# Altium schematic symbol library Centralize.SchLib: 1081 symbols (part 12 of 26)
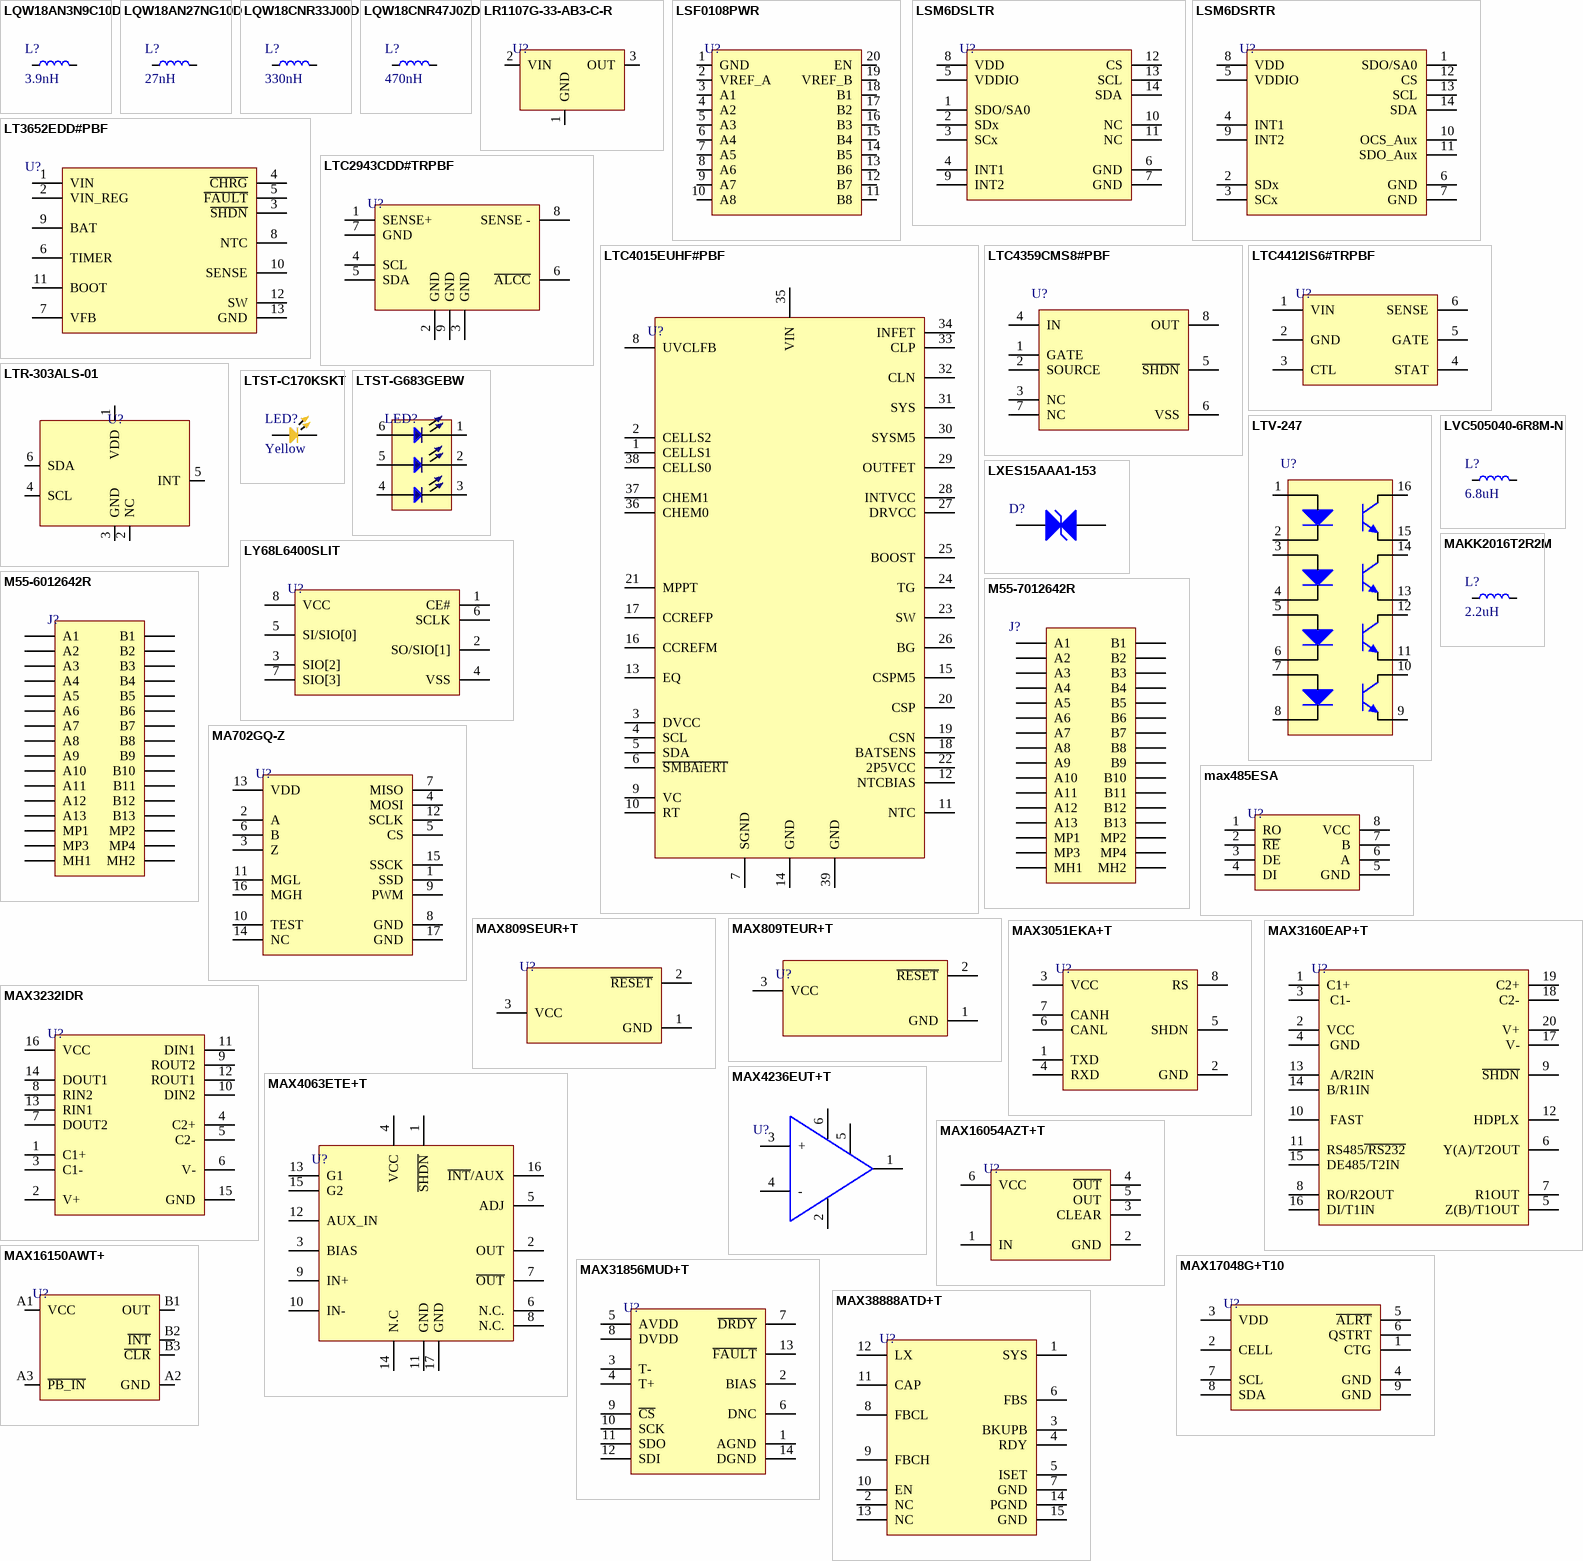
[diagram p58: symbols LQW18AN3N9C10D to MAX38888ATD+T]

## MAX31856MUD+T
designator U?
IC CONV THERMOCOUPLE 14TSSOP; Manufacturer: Maxim; Manufacturer Part Number: MAX31856MUD+T; Interface: SPI; Operating Supply Current: 1.2mA; Output Type: Digital; Supplier 1: Arrow Electronics; RoHS: Yes; Category: Interface ICs; Stock 1: 2890; Pricing 1: 1=10.21890, 10=9.52090, 25=9.06320, 100=7.80510, 250=7.38990, 500=6.66890, 1000=6.39750, 3000=6.32960 (USD); Mount: Surface Mount; Case/Package: TSSOP; Number of Pins: 14; Min Operating Temperature: -55°C; Max Operating Temperature: 125°C; Packaging: Tape and Reel; RoHS Compliant: Yes; ComponentLink1URL: https://media.digikey.com/pdf/Data%20Sheets/Maxim%20PDFs/PartNumberBreakdown_ds.pdf?src-supplier=Digi-Key; ComponentLink1Description: https://media.digikey.com/pdf/Data%20Sheets/Maxim%20PDFs/PartNumberBreakdown_ds.pdf?src-supplier=Digi-Key; ComponentLink2URL: http://datasheets.maximintegrated.com/en/ds/MAX31856.pdf?src-supplier=Avnet; ComponentLink2Description: http://datasheets.maximintegrated.com/en/ds/MAX31856.pdf?src-supplier=Avnet; Supplier Part Number 1: MAX31856MUD+T; LCSC Part Number: C2653162; Item Type: IC
footprint 14-TSSOP
pins: 1 AGND, 2 BIAS, 3 T-, 4 T+, 5 AVDD, 6 DNC, 7 ~{DRDY}, 8 DVDD, 9 ~{CS}, 10 SCK, 11 SDO, 12 SDI, 13 ~{F}~{AULT}, 14 DGND

## MAX38888ATD+T
designator U?
IC BATT MFUNC SUPERCAP 14TDFN; Manufacturer: Maxim; Manufacturer Part Number: MAX38888ATD+T; Supplier 1: Mouser; RoHS: No; Category: Battery Management; Stock 1: 1586; Pricing 1: 1=8.16, 10=7.38, 50=7.04, 100=6.11, 1000=5.15, 10000=4.97 (USD); Supplier Part Number 1: 700-MAX38888ATD+T; LCSC Part Number: C2931491; Item Type: IC
footprint TDFN-14-EP(3x3)
pins: 1 SYS, 2 NC, 3 BKUPB, 4 RDY, 5 ISET, 6 FBS, 7 GND, 8 FBCL, 9 FBCH, 10 EN, 11 CAP, 12 LX, 13 NC, 14 PGND, 15 GND

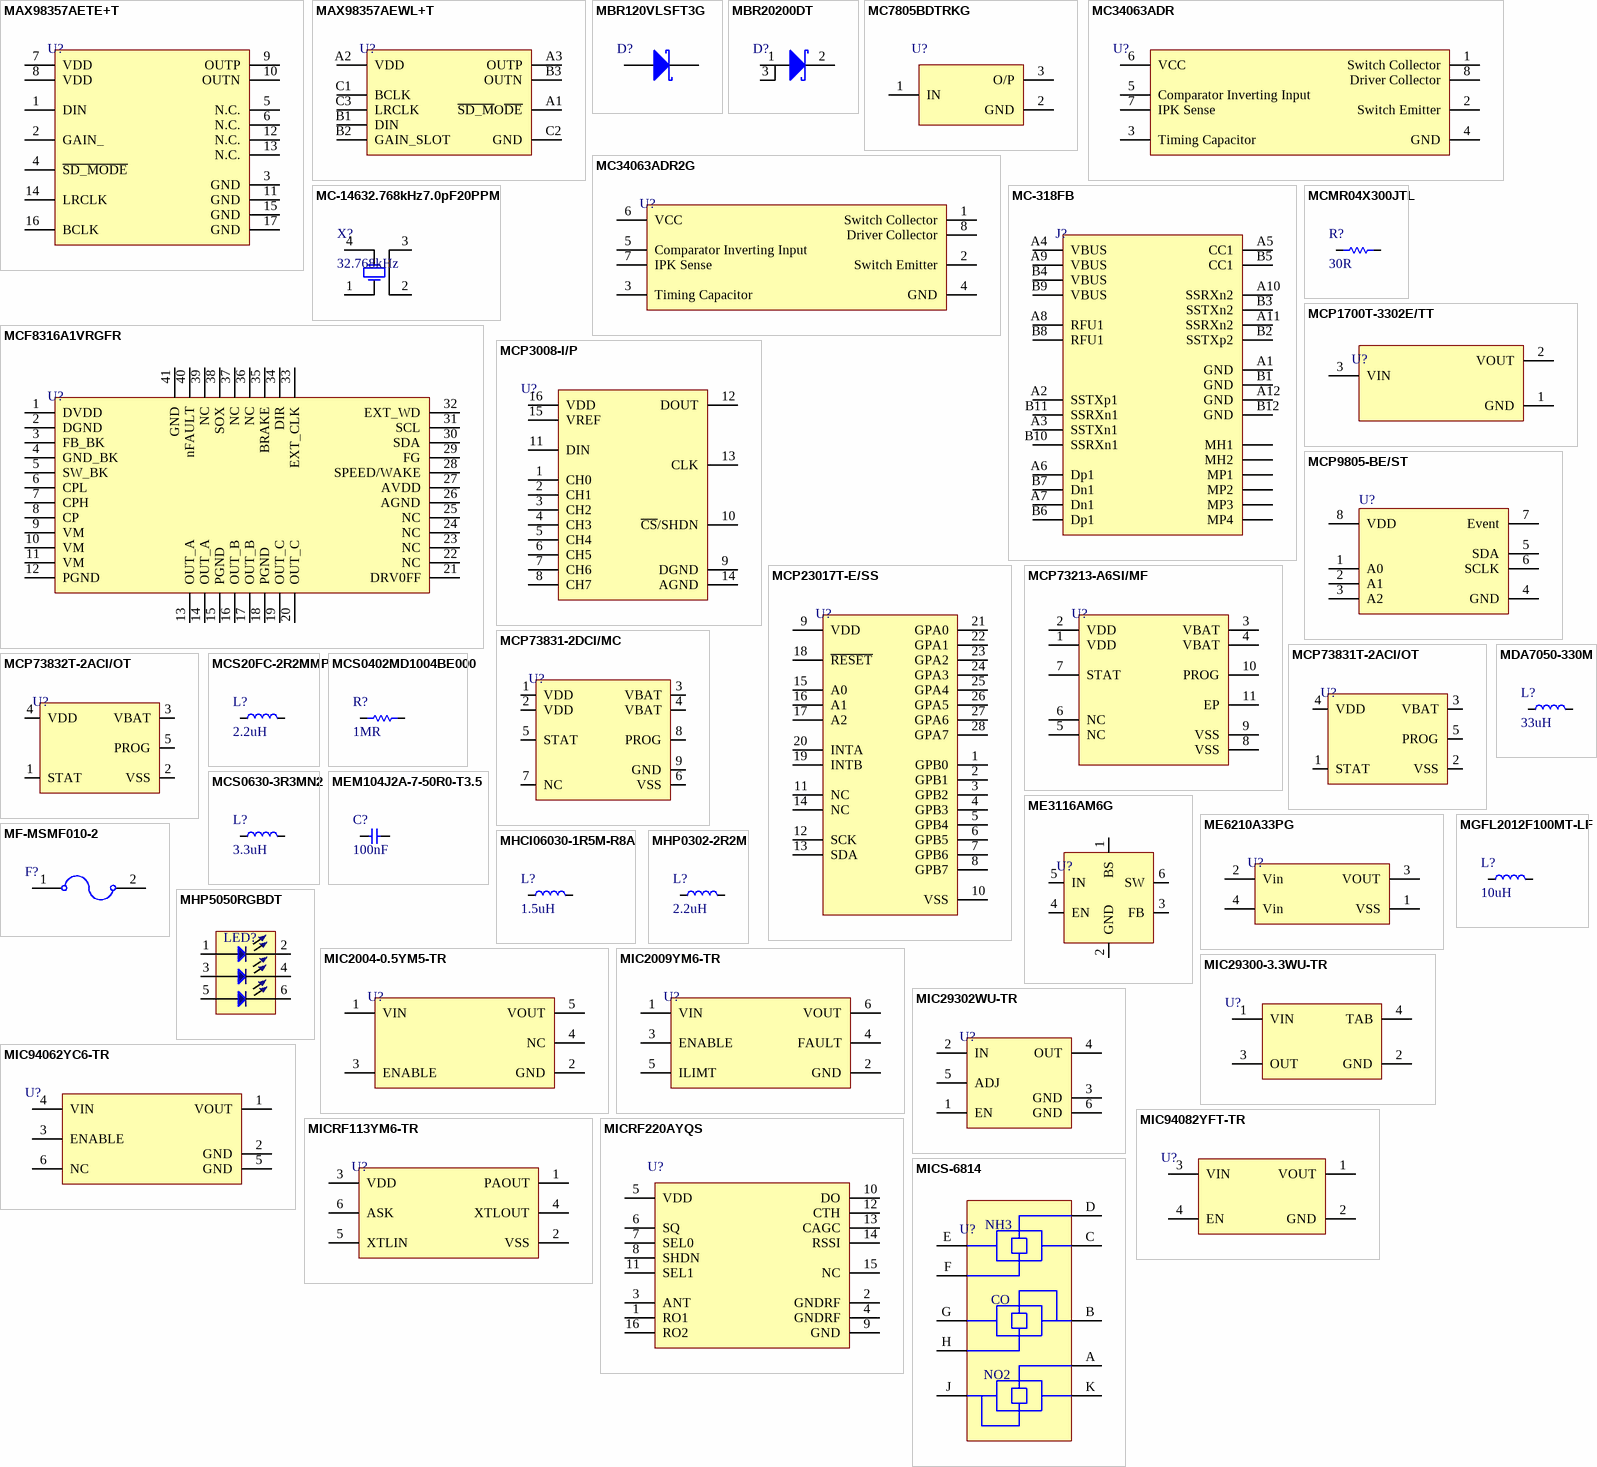
[diagram p15: symbols MAX98357AETE+T to MICS-6814]

## MAX98357AETE+T
designator U?
Audio Amplifier, 1 Func, PQCC16; Manufacturer: Maxim; Manufacturer Part Number: MAX98357AETE+T; Package Body Material: Plastic; Channels: 1; Package Equivalence Code: LCC16,.12SQ,20; Power Supplies: 5V; Max Supply Current: 3mA; Qualification Status: Not Qualified; Item Type: IC; Supplier 1: Arrow Electronics; RoHS: Yes; Category: Amplifiers - Audio; Stock 1: 2; Pricing 1: 1=2.83800 (USD); Case/Package: QCCN; Pins: 16; Package Shape: Square; Min Operating Temperature: -40°C; Max Operating Temperature: 85°C; Consumer IC Type: AUDIO AMPLIFIER; JESD-30 Code: S-PQCC-N16; Moisture Sensitivity Level: 1; Package Style: CHIP CARRIERMeter; Surface Mount: Yes; Terminal Form: No Lead; Terminal Position: QUAD; Terminal Pitch: 0.5mm; Temperature Grade: INDUSTRIAL; Reach SVHC Compliant: Yes; RoHS Compliant: Yes; ComponentLink1URL: https://datasheet.ciiva.com:443/pdfs/VipMasterIC/IC/MAXM/MAXM-S-A0007997446/MAXM-S-A0007997446-1.pdf?src-supplier=IHS+Markit; ComponentLink1Description: https://datasheet.ciiva.com:443/pdfs/VipMasterIC/IC/MAXM/MAXM-S-A0007997446/MAXM-S-A0007997446-1.pdf?src-supplier=IHS+Markit; ComponentLink2URL: https://datasheet.ciiva.com/29970/max98357a-max98357b-29970280.pdf?src-supplier=Avnet; ComponentLink2Description: https://datasheet.ciiva.com/29970/max98357a-max98357b-29970280.pdf?src-supplier=Avnet; Supplier Part Number 1: MAX98357AETE+T; LCSC Part Number: C910544
footprint TQFN-16-EP(3x3)
pins: 1 DIN, 2 GAIN_, 3 GND, 4 ~{SD_MODE}, 5 N.C., 6 N.C., 7 VDD, 8 VDD, 9 OUTP, 10 OUTN, 11 GND, 12 N.C., 13 N.C., 14 LRCLK, 15 GND, 16 BCLK, 17 GND

## MAX98357AEWL+T
designator U?
IC AUDIO AMP PCM D WLP; Manufacturer: Maxim; Manufacturer Part Number: MAX98357AEWL+T; Voltage Gain: 15dB; Min Supply Voltage: 2.5V; Max Supply Voltage: 5.5V; Max Output Power: 3.2W; Power Supply Rejection Ratio (PSRR): 77dB; Max Power Dissipation: 1.096W; Max Output current: 1.6A; Supplier 1: Arrow Electronics; RoHS: Yes; Category: Amplifiers - Audio; Stock 1: 2497; Pricing 1: 1=2.70500, 10=2.45700, 25=2.28600, 100=1.93500, 250=1.86200, 500=1.65900, 1000=1.54600 (USD); Mounting Technology: Surface Mount; Pins: 9; Contact Plating: Copper,Tin,Silver; Min Operating Temperature: -40°C; Max Operating Temperature: 85°C; Packaging: Tape and Reel; Package Quantity: 2500; Radiation Hardening: No; RoHS Compliant: Yes; ComponentLink1URL: https://datasheet.ciiva.com/45423/max98357a-max98357b-45423932.pdf?src-supplier=Digi-Key; ComponentLink1Description: https://datasheet.ciiva.com/45423/max98357a-max98357b-45423932.pdf?src-supplier=Digi-Key; Supplier Part Number 1: MAX98357AEWL+T; LCSC Part Number: C2682619; Item Type: IC
footprint 9-WLP (1.26x1.26)
pins: A1 ~{SD_M}O~{DE}, A2 VDD, A3 OUTP, B1 DIN, B2 GAIN_SLOT, B3 OUTN, C1 BCLK, C2 GND, C3 LRCLK

## MBR120VLSFT3G
designator D?
DIODE SCHOTTKY 20V 1A SOD123FL; Manufacturer: ON Semiconductor; Manufacturer Part Number: MBR120VLSFT3G; Max Surge Current: 45A; Forward Voltage: 340mV; Peak Reverse Current: 600uA; Element Configuration: Single; Polarity: Standard; Supplier 1: Digi-Key; Stock 1: 130499; Pricing 1: 1=0.42, 10=0.338, 100=0.2298, 500=0.17234, 1000=0.12926 (USD); Number of Pins: 2; Min Operating Temperature: -65°C; Max Operating Temperature: 125°C; Package Quantity: 10000; Forward Current: 1A; Packaging: Tape and Reel; Max Reverse Leakage Current: 600uA; Average Rectified Current: 1A; Peak Non-Repetitive Surge Current: 45A; Max Repetitive Reverse Voltage (Vrrm): 20V; Max Forward Surge Current (Ifsm): 45A; Voltage Rating (DC): 20V; Current Rating: 1A; Output Current: 1A; Max Reverse Voltage (DC): 20V; Radiation Hardening: No; REACH SVHC: No SVHC; Lead Free: Lead Free; Halogen Free: Halogen Free; ComponentLink1URL: http://www.mouser.com/ds/2/308/MBR120VLSFT1-D-107081.pdf?src-supplier=Mouser; ComponentLink1Description: http://www.mouser.com/ds/2/308/MBR120VLSFT1-D-107081.pdf?src-supplier=Mouser; ComponentLink2URL: http://www.onsemi.com/pub/Collateral/MBR120VLSFT1-D.PDF?src-supplier=Digi-Key; ComponentLink2Description: http://www.onsemi.com/pub/Collateral/MBR120VLSFT1-D.PDF?src-supplier=Digi-Key; ComponentLink3URL: http://www.onsemi.cn/pub_link/Collateral/MBR120VLSFT1-D.PDF?src-supplier=Avnet; ComponentLink3Description: http://www.onsemi.cn/pub_link/Collateral/MBR120VLSFT1-D.PDF?src-supplier=Avnet; Supplier Part Number 1: MBR120VLSFT3GOSCT-ND; LCSC Part Number: C295749
footprint SOD-123
pins: 1 A, 2 K

## MBR20200DT
designator D?
200V Single 920mV@10A 20A TO-252 Schottky Barrier Diodes (SBD) ROHS; Manufacturer: JUXING; Manufacturer Part Number: MBR20200DT; Item Type: Diode; Package: TO-252; LCSC Part Number: C3011045; ComponentLink1Description: LCSC; ComponentLink1URL: https://www.lcsc.com/product-detail/span-style-background-color-ff0-Schottky-span-Barrier-Diodes-SBD_JUXING-MBR20200DT_C3011045.html
footprint TO-252-2L
pins: 1, 2, 3

## MC7805BDTRKG
designator U?
IC REG LINEAR 5V 1A DPAK; Manufacturer: onsemi; Manufacturer Part Number: MC7805BDTRKG; Item Type: Regulator; Package: TO-252-2(DPAK); LCSC Part Number: C110908; ComponentLink1Description: LCSC; ComponentLink1URL: https://www.lcsc.com/product-detail/Linear-Voltage-Regulators-LDO_onsemi-MC7805BDTRKG_C110908.html
footprint DPAK_
pins: 1 IN, 2 GND, 3 O/P

## MC34063ADR
designator U?
IC REG BUCK BST ADJ 1.5A 8SOIC; Manufacturer: Texas Instruments; Manufacturer Part Number: MC34063ADR; Output Voltage: 40V; Number of Outputs: 1; Switching Frequency: 100kHz; Synchronous Rectifier: No; Output Type: Adjustable; Max Output Current: 750mA; Min Input Voltage: 3V; Min Output Voltage: 1.55V; Quiescent Current: 4mA; Topology: Flyback,SEPIC; Supplier 1: Digi-Key; RoHS: Yes; Category: Power Supply Modules; Stock 1: 17204; Pricing 1: 1=0.78000, 10=0.68400, 25=0.64240, 100=0.52420, 250=0.48688, 500=0.41438, 1000=0.34206 (USD); Case/Package: D; Number of Pins: 8; Weight: 0.002561oz; Contact Plating: Gold; Min Operating Temperature: 0°C; Max Operating Temperature: 70°C; Output Current: 1.5A; Packaging: Tape and Reel; Package Quantity: 1; Max Input Voltage: 40V; Max Output Voltage: 40V; Termination: SMD/SMT; Radiation Hardening: No; RoHS Compliant: Yes; Lead Free: Lead Free; REACH SVHC: No SVHC; ComponentLink1URL: https://datasheet.ciiva.com/7408/1862376-7408060.pdf?src-supplier=Newark; ComponentLink1Description: https://datasheet.ciiva.com/7408/1862376-7408060.pdf?src-supplier=Newark; ComponentLink2URL: https://datasheet.ciiva.com/2025/mc33063a-2025162.pdf?src-supplier=Digi-Key; ComponentLink2Description: https://datasheet.ciiva.com/2025/mc33063a-2025162.pdf?src-supplier=Digi-Key; ComponentLink3URL: https://datasheet.ciiva.com/2025/mc33063a-2025161.pdf?src-supplier=Digi-Key; ComponentLink3Description: https://datasheet.ciiva.com/2025/mc33063a-2025161.pdf?src-supplier=Digi-Key; ComponentLink4URL: https://datasheet.ciiva.com/2025/mc33063a-2025163.pdf?src-supplier=Digi-Key; ComponentLink4Description: https://datasheet.ciiva.com/2025/mc33063a-2025163.pdf?src-supplier=Digi-Key; Supplier Part Number 1: 296-17765-1-ND; LCSC Part Number: C100023; Item Type: IC
footprint SOIC-8
pins: 1 Switch Collector, 2 Switch Emitter, 3 Timing Capacitor, 4 GND, 5 Comparator Inverting Input, 6 VCC, 7 IPK Sense, 8 Driver Collector

## MC34063ADR2G
designator U?
IC REG BUCK BOOST INV ADJ 8SOIC; Manufacturer: ON Semiconductor; Manufacturer Part Number: MC34063ADR2G; Number of Outputs: 1; Output Voltage: 40V; Max Output Current: 1.5A; Min Input Voltage: 3V; Switching Frequency: 100kHz; Synchronous Rectifier: No; Min Output Voltage: 1.25V; Output Type: Adjustable; Supplier 1: Arrow Electronics; RoHS: Yes; Category: Voltage Regulators - Switching; Stock 1: 2000; Pricing 1: 1=0.59300, 10=0.47930, 25=0.47460, 100=0.29030, 250=0.28740, 500=0.28460, 1000=0.25300, 3000=0.22150 (USD); Mount: Surface Mount; Case/Package: SOIC; Number of Pins: 8; Contact Plating: Tin,Matte; Min Operating Temperature: 0°C; Max Operating Temperature: 70°C; Package Quantity: 1; Packaging: Tape and Reel; Output Current: 1.5A; Max Input Voltage: 40V; Max Output Voltage: 40V; Series: -; Switching Frequency-Max: 100kHz; Length: 5mm; Width: 4mm; Height: 1.5mm; Radiation Hardening: No; REACH SVHC: No SVHC; Lead Free: Lead Free; Halogen Free: Halogen Free; RoHS Compliant: Yes; ComponentLink1URL: https://datasheet.ciiva.com/34301/871666-34301629.pdf?src-supplier=Jameco; ComponentLink1Description: https://datasheet.ciiva.com/34301/871666-34301629.pdf?src-supplier=Jameco; ComponentLink2URL: https://datasheet.ciiva.com/15112/getdatasheetpartid-59933-15112667.pdf?src-supplier=Verical; ComponentLink2Description: https://datasheet.ciiva.com/15112/getdatasheetpartid-59933-15112667.pdf?src-supplier=Verical; ComponentLink3URL: https://datasheet.ciiva.com/2025/mc34063a-d-2025168.pdf?src-supplier=Digi-Key; ComponentLink3Description: https://datasheet.ciiva.com/2025/mc34063a-d-2025168.pdf?src-supplier=Digi-Key; ComponentLink4URL: https://datasheet.ciiva.com/3217/mc34063a-d-3217624.pdf?src-supplier=Avnet; ComponentLink4Description: https://datasheet.ciiva.com/3217/mc34063a-d-3217624.pdf?src-supplier=Avnet; ComponentLink5URL: https://datasheet.ciiva.com/3217/mc34063a-d-3217493.pdf?src-supplier=Avnet; ComponentLink5Description: https://datasheet.ciiva.com/3217/mc34063a-d-3217493.pdf?src-supplier=Avnet; ComponentLink6URL: https://datasheet.ciiva.com/2025/mc34063a-d-2025169.pdf?src-supplier=Digi-Key; ComponentLink6Description: https://datasheet.ciiva.com/2025/mc34063a-d-2025169.pdf?src-supplier=Digi-Key; ComponentLink7URL: https://datasheet.ciiva.com/2025/mc34063a-d-2025167.pdf?src-supplier=Digi-Key; ComponentLink7Description: https://datasheet.ciiva.com/2025/mc34063a-d-2025167.pdf?src-supplier=Digi-Key; Supplier Part Number 1: MC34063ADR2G; Item Type: IC
footprint SOIC-8
pins: 1 Switch Collector, 2 Switch Emitter, 3 Timing Capacitor, 4 GND, 5 Comparator Inverting Input, 6 VCC, 7 IPK Sense, 8 Driver Collector

## MC-318FB
designator J?
USB 3.0 3A 1 Brick nogging 24 Female -35℃~+75℃ Type-C SMD USB Connectors ROHS; Manufacturer: SOFNG; Manufacturer Part Number: MC-318FB; ComponentLink1Description: LCSC; ComponentLink1URL: https://www.lcsc.com/product-detail/USB-Connectors_SOFNG-MC-318FB_C2977724.html; Footprint: Custom; LCSC Part Number: C2977724
footprint MC-318FB
pins: A1 GND, A2 SSTXp1, A3 SSTXn1, A4 VBUS, A5 CC1, A6 Dp1, A7 Dn1, A8 RFU1, A9 VBUS, A10 SSRXn2, A11 SSRXn2, A12 GND, B1 GND, B2 SSTXp2, B3 SSTXn2, B4 VBUS, B5 CC1, B6 Dp1, B7 Dn1, B8 RFU1, B9 VBUS, B10 SSRXn1, B11 SSRXn1, B12 GND, MH1, MH2, MP1, MP2, MP3, MP4

## MC-14632.768kHz7.0pF20PPM
designator X?, comment 32.768kHz
32.768kHz SMD Crystal Resonator 7pF 65kΩ ±20ppm -40℃~+85℃ MC-146 Crystals ROHS; Manufacturer: Seiko Epson; Manufacturer Part Number: MC-14632.768kHz7.0pF20PPM; Footprint: MC-146; ComponentLink1Description: LCSC; ComponentLink1URL: https://www.lcsc.com/product-detail/Crystals_Seiko-Epson-MC-14632-768kHz7-0pF20PPM_C94977.html; LCSC Part Number: C94977
footprint MC-146_
pins: 1 OSC1, 2, 3, 4 OSC2

## MCF8316A1VRGFR
designator U?
40-V max, 8-A peak, sensorless FOC control 3-phase BLDC motor driver 40-VQFN -40 to 125; Manufacturer: Texas Instruments; Manufacturer Part Number: MCF8316A1VRGFR; Supplier 1: Mouser; RoHS: No; Stock 1: 889; Pricing 1: 1=5.48000, 10=4.92000, 25=4.65000, 50=4.65000, 100=4.04000, 250=3.83000, 500=3.44000, 1000=3.00000, 10000=3.00000 (USD); Supplier Part Number 1: 595-MCF8316A1VRGFR; LCSC Part Number: C3681167
footprint 40-VQFN (7x5)
pins: 1 DVDD, 2 DGND, 3 FB_BK, 4 GND_BK, 5 SW_BK, 6 CPL, 7 CPH, 8 CP, 9 VM, 10 VM, 11 VM, 12 PGND, 13 OUT_A, 14 OUT_A, 15 PGND, 16 OUT_B, 17 OUT_B, 18 PGND, 19 OUT_C, 20 OUT_C, 21 DRV0FF, 22 NC, 23 NC, 24 NC, 25 NC, 26 AGND, 27 AVDD, 28 SPEED/WAKE, 29 FG, 30 SDA, 31 SCL, 32 EXT_WD, 33 EXT_CLK, 34 DIR, 35 BRAKE, 36 NC, 37 NC, 38 SOX, 39 NC, 40 nFAULT, 41 GND

## MCMR04X300JTL
designator R?, comment 30R
SMD Chip Resistor, Ceramic, 30 ohm, ± 5%, 62.5 mW, 0402 [1005 Metric], Thick Film, Sulfur Resistant; Manufacturer: Multicomp; Manufacturer Part Number: MCMR04X300JTL; Voltage Rating: 50V; Power Rating: 62.5mW; Temperature Coefficient: 100ppm/°C; Supplier 1: Farnell; RoHS: Yes; Category: Chip SMD Resistors; Pricing 1: 10=0.00420, 100=0.00380, 500=0.00330, 2500=0.00220, 5000=0.00180, 10000=0.00150, 50000=0.00110, 100000=0.00100 (GBP); Case/Package: 0402; Case Code (Metric): 1005; Case Code (Imperial): 0402; Packaging: Cut Tape; Value: 30R; Tolerance: 5%; Resistor Type: Ceramic; Voltage Rating (DC): 50V; Resistance Tolerance: 5%; Reach SVHC Compliant: Yes; RoHS Compliant: Yes; ComponentLink1URL: https://datasheet.ciiva.com/7942/1716706-7942703.pdf?src-supplier=Element14; ComponentLink1Description: https://datasheet.ciiva.com/7942/1716706-7942703.pdf?src-supplier=Element14; Supplier Part Number 1: 2072892; Item Type: Resistor
footprint Res-0402
pins: 1, 2

## MCP1700T-3302E/TT
designator U?
IC REG LDO 3.3V 0.25A SOT23-3; Manufacturer: Microchip; Manufacturer Part Number: MCP1700T-3302E/TT; Number of Outputs: 1; Min Input Voltage: 2.3V; Max Input Voltage: 6V; Dropout Voltage: 178mV; Output Current: 250mA; Max Power Dissipation: 369.6mW; Input Bias Current: 1.6uA; Polarity: Positive; Quiescent Current: 4uA; Accuracy: 2%; Output Type: Fixed; Supplier 1: Digi-Key; RoHS: Yes; Category: Voltage Regulators - Linear; Stock 1: 230029; Pricing 1: 1=0.50000, 25=0.42400, 100=0.37500 (USD); Mount: Surface Mount; Case/Package: SOT-23; Number of Pins: 3; Contact Plating: Tin,Matte; Min Operating Temperature: -40°C; Max Operating Temperature: 125°C; Nominal Output Voltage: 3.3V; Packaging: Tape and Reel; Output Voltage: 3.3V; Max Output Current: 250mA; Max Supply Voltage: 6V; Min Supply Voltage: 2.3V; Package Quantity: 3000; Min Output Voltage: 3.3V; Max Output Voltage: 3.3V; Termination: SMD/SMT; Output Voltage Accuracy: 2%; Nominal Supply Current: 4uA; Power Dissipation: 369.6mW; Supply Current: 4uA; Length: 2.9mm; Width: 1.3mm; Height: 0.95mm; Radiation Hardening: No; Reach SVHC Compliant: No SVHC; Lead Free: Lead Free; RoHS Compliant: Yes; ComponentLink1URL: https://datasheet.ciiva.com/5801/1784514-5801824.pdf?src-supplier=Farnell; ComponentLink1Description: https://datasheet.ciiva.com/5801/1784514-5801824.pdf?src-supplier=Farnell; ComponentLink2URL: https://datasheet.ciiva.com/2040/21826b-2040112.pdf?src-supplier=Digi-Key; ComponentLink2Description: https://datasheet.ciiva.com/2040/21826b-2040112.pdf?src-supplier=Digi-Key; ComponentLink3URL: https://datasheet.ciiva.com/7649/1784514-7649813.pdf?src-supplier=Element14; ComponentLink3Description: https://datasheet.ciiva.com/7649/1784514-7649813.pdf?src-supplier=Element14; ComponentLink4URL: https://datasheet.ciiva.com/22710/1784514-22710988.pdf?src-supplier=Element14; ComponentLink4Description: https://datasheet.ciiva.com/22710/1784514-22710988.pdf?src-supplier=Element14; ComponentLink5URL: https://datasheet.ciiva.com/14150/mcp1700-eng-tds-14150122.pdf?src-supplier=Distrelec; ComponentLink5Description: https://datasheet.ciiva.com/14150/mcp1700-eng-tds-14150122.pdf?src-supplier=Distrelec; ComponentLink6URL: https://datasheet.ciiva.com/8041/1784514-8041598.pdf?src-supplier=Element14; ComponentLink6Description: https://datasheet.ciiva.com/8041/1784514-8041598.pdf?src-supplier=Element14; ComponentLink7URL: https://datasheet.ciiva.com/3224/jp011779-3224133.pdf?src-supplier=Avnet; ComponentLink7Description: https://datasheet.ciiva.com/3224/jp011779-3224133.pdf?src-supplier=Avnet; ComponentLink8URL: https://datasheet.ciiva.com/16208/filehandler-aspxddocname-en011779-16208911.pdf?src-supplier=Future+Electronics; ComponentLink8Description: https://datasheet.ciiva.com/16208/filehandler-aspxddocname-en011779-16208911.pdf?src-supplier=Future+Electronics; ComponentLink9URL: https://datasheet.ciiva.com/15200/getdatasheetpartid-453599-15200229.pdf?src-supplier=Verical; ComponentLink9Description: https://datasheet.ciiva.com/15200/getdatasheetpartid-453599-15200229.pdf?src-supplier=Verical; ComponentLink10URL: https://datasheet.ciiva.com/2040/21826b-2040113.pdf?src-supplier=Digi-Key; ComponentLink10Description: https://datasheet.ciiva.com/2040/21826b-2040113.pdf?src-supplier=Digi-Key; ComponentLink11URL: https://datasheet.ciiva.com/2040/21826b-2040114.pdf?src-supplier=Digi-Key; ComponentLink11Description: https://datasheet.ciiva.com/2040/21826b-2040114.pdf?src-supplier=Digi-Key; ComponentLink12URL: https://datasheet.ciiva.com/29305/651414-da-01-en-ic-reg-ld-mcp1700t-3302e-tt-sot-23-3-mcp-29305258.pdf?src-supplier=Conrad; ComponentLink12Description: https://datasheet.ciiva.com/29305/651414-da-01-en-ic-reg-ld-mcp1700t-3302e-tt-sot-23-3-mcp-29305258.pdf?src-supplier=Conrad; Supplier Part Number 1: MCP1700T3302ETTCT-ND; Item Type: IC
footprint SOT-23 (TRANS NPN 40V 0.6A SOT23)
pins: 1 GND, 2 VOUT, 3 VIN

## MCP3008-I/P
designator U?
IC ADC 10BIT SAR 16DIP; Manufacturer: Microchip; Manufacturer Part Number: MCP3008-I/P; Resolution: 10b; Sampling Rate: 200KS/s; Number of A/D Converters: 1; Polarity: Unipolar; Min Supply Voltage: 2.7V; Max Supply Voltage: 5.5V; Interface: SPI,Serial,4-WIRE; Number of Channels: 8; Number of Bits: 10; Differential Nonlinearity: 1LSB; Signal to Noise Ratio (SNR): 200dB; Nominal Supply Current: 425uA; Input Type: SINGLE-ENDED; Operating Supply Voltage: 5V; Supplier 1: Digi-Key; Stock 1: 1628; Pricing 1: 1=2.41, 25=2, 100=1.83 (USD); Mount: Through Hole; Case/Package: PDIP; Number of Pins: 16; Weight: 0.01lb; Min Operating Temperature: -40°C; Max Operating Temperature: 85°C; Package Quantity: 30; Packaging: Rail/Tube; Number of Converters: 1; Number of Elements: 1; Conversion Rate: 200KS/s; Integral Nonlinearity (INL): 1LSB; Supply Current: 425uA; Length: 19.05mm; Width: 6.35mm; Height: 3.3mm; Radiation Hardening: No; REACH SVHC: No SVHC; Lead Free: Lead Free; RoHS Compliant: Yes; ComponentLink1URL: http://www.farnell.com/datasheets/808965.pdf?src-supplier=Element14; ComponentLink1Description: http://www.farnell.com/datasheets/808965.pdf?src-supplier=Element14; ComponentLink2URL: http://ww1.microchip.com/downloads/jp/DeviceDoc/jp011593.pdf?src-supplier=Avnet; ComponentLink2Description: http://ww1.microchip.com/downloads/jp/DeviceDoc/jp011593.pdf?src-supplier=Avnet; ComponentLink3URL: http://ww1.microchip.com/downloads/jp/DeviceDoc/jp011593.pdf?src-supplier=Avnet+Europe; ComponentLink3Description: http://ww1.microchip.com/downloads/jp/DeviceDoc/jp011593.pdf?src-supplier=Avnet+Europe; ComponentLink4URL: http://www.microchip.com/mymicrochip/filehandler.aspx?ddocname=en023833&src-supplier=Digi-Key; ComponentLink4Description: http://www.microchip.com/mymicrochip/filehandler.aspx?ddocname=en023833&src-supplier=Digi-Key; Supplier Part Number 1: MCP3008-I/P-ND; LCSC Part Number: C2890491
footprint PDIP-16
pins: 1 CH0, 2 CH1, 3 CH2, 4 CH3, 5 CH4, 6 CH5, 7 CH6, 8 CH7, 9 DGND, 10 ~{CS}/SHDN, 11 DIN, 12 DOUT, 13 CLK, 14 AGND, 15 VREF, 16 VDD

## MCP9805-BE/ST
designator U?
IC SENSOR THERMAL 3.0V 8TSSOP; Manufacturer: Microchip; Manufacturer Part Number: MCP9805-BE/ST; Min Supply Voltage: 3V; Max Supply Voltage: 3.6V; Output Current: 1uA; Interface: I2C,SMBus,2-Wire,Serial; Resolution: 10b; Operating Supply Current: 200uA; Accuracy: 2%; Number of Bits: 10; Output Type: I2C,Digital; Sensor Type: Temperature; Sensing Method: Resistive; ComponentLink1URL: https://datasheet.ciiva.com/22737/1678782-22737270.pdf?src-supplier=Element14; ComponentLink1Description: https://datasheet.ciiva.com/22737/1678782-22737270.pdf?src-supplier=Element14; ComponentLink2URL: https://datasheet.ciiva.com/43467/1678782-43467032.pdf?src-supplier=Farnell; ComponentLink2Description: https://datasheet.ciiva.com/43467/1678782-43467032.pdf?src-supplier=Farnell; ComponentLink3URL: https://datasheet.ciiva.com/22673/1678782-22673662.pdf?src-supplier=Element14; ComponentLink3Description: https://datasheet.ciiva.com/22673/1678782-22673662.pdf?src-supplier=Element14; Supplier 1: Digi-Key; RoHS: Yes; Category: Power Management ICs; Stock 1: 667; Pricing 1: 1=0.85000, 25=0.71000, 100=0.65000 (USD); Mount: Surface Mount; Case/Package: TSSOP; Number of Pins: 8; Min Operating Temperature: -40°C; Max Operating Temperature: 125°C; Package Quantity: 100; Packaging: Rail/Tube; Max Supply Voltage (DC): 3.6V; Min Supply Voltage (DC): 3V; Termination: SMD/SMT; Length: 3mm; Width: 4.4mm; Height: 1mm; Radiation Hardening: No; REACH SVHC: No SVHC; Lead Free: Lead Free; RoHS Compliant: Yes; ComponentLink4URL: https://datasheet.ciiva.com/1514/1791047-1514016.pdf?src-supplier=Element14; ComponentLink4Description: https://datasheet.ciiva.com/1514/1791047-1514016.pdf?src-supplier=Element14; ComponentLink5URL: https://datasheet.ciiva.com/2003/21977b-2003478.pdf?src-supplier=Digi-Key; ComponentLink5Description: https://datasheet.ciiva.com/2003/21977b-2003478.pdf?src-supplier=Digi-Key; ComponentLink6URL: https://datasheet.ciiva.com/5299/21977b-77986-5299688.pdf?src-supplier=Mouser; ComponentLink6Description: https://datasheet.ciiva.com/5299/21977b-77986-5299688.pdf?src-supplier=Mouser; ComponentLink7URL: https://datasheet.ciiva.com/3279/21977b-3279902.pdf?src-supplier=Avnet; ComponentLink7Description: https://datasheet.ciiva.com/3279/21977b-3279902.pdf?src-supplier=Avnet; Supplier Part Number 1: MCP9805-BE/ST-ND; LCSC Part Number: C636441; Item Type: IC
footprint 8-TSSOP (IC SENSOR THERMAL 3.0V 8TSSOP)
pins: 1 A0, 2 A1, 3 A2, 4 GND, 5 SDA, 6 SCLK, 7 Event, 8 VDD

## MCP23017T-E/SS
designator U?
IC XPNDR 1.7MHZ I2C 28SSOP; Manufacturer: Microchip; Manufacturer Part Number: MCP23017T-E/SS; Operating Supply Voltage: 5.5V; Interface: I2C,Serial; Number of Channels: 1; Output Current: 25mA; Number of I/Os: 16; Power Dissipation: 700mW; Clock Frequency: 10MHz; Output Type: PUSH-PULL; Supply Current: 1mA; Supplier 1: Digi-Key; RoHS: Yes; Category: Interface ICs; Stock 1: 26314; Pricing 1: 1=1.69, 25=1.4, 100=1.28 (USD); Mounting Technology: Surface Mount; Case/Package: SSOP; Pins: 28; Min Operating Temperature: -40°C; Max Operating Temperature: 125°C; Package Quantity: 2100; Series: -; Packaging: Tape and Reel; Frequency: 1.7MHz; Number of Bits: 16; Nominal Supply Voltage: 5.5V; Lead Free: Lead Free; RoHS Compliant: Yes; ComponentLink1URL: https://datasheet.ciiva.com/12267/21952b-12267583.pdf?src-supplier=Mouser; ComponentLink1Description: https://datasheet.ciiva.com/12267/21952b-12267583.pdf?src-supplier=Mouser; ComponentLink2URL: https://datasheet.ciiva.com/8128/21952b-8128586.pdf?src-supplier=Avnet; ComponentLink2Description: https://datasheet.ciiva.com/8128/21952b-8128586.pdf?src-supplier=Avnet; ComponentLink3URL: https://datasheet.ciiva.com/16454/filehandler-aspxddocname-en023709-16454267.pdf?src-supplier=Future+Electronics; ComponentLink3Description: https://datasheet.ciiva.com/16454/filehandler-aspxddocname-en023709-16454267.pdf?src-supplier=Future+Electronics; ComponentLink4URL: https://datasheet.ciiva.com/1780/21952b-1780738.pdf?src-supplier=Digi-Key; ComponentLink4Description: https://datasheet.ciiva.com/1780/21952b-1780738.pdf?src-supplier=Digi-Key; Supplier Part Number 1: MCP23017T-E/SSCT-ND; LCSC Part Number: C558584; Item Type: IC
footprint SSOP-28-208mil
pins: 1 GPB0, 2 GPB1, 3 GPB2, 4 GPB3, 5 GPB4, 6 GPB5, 7 GPB6, 8 GPB7, 9 VDD, 10 VSS, 11 NC, 12 SCK, 13 SDA, 14 NC, 15 A0, 16 A1, 17 A2, 18 ~{RESET}, 19 INTB, 20 INTA, 21 GPA0, 22 GPA1, 23 GPA2, 24 GPA3, 25 GPA4, 26 GPA5, 27 GPA6, 28 GPA7

## MCP73213-A6SI/MF
designator U?
IC BATT CONTRL LI-ION 2CEL 10DFN; Manufacturer: Microchip; Manufacturer Part Number: MCP73213-A6SI/MF; Number of Cells: 2; Max Supply Voltage: 18V; Min Supply Voltage: 4.2V; Output Voltage: 8.4V; Max Output current: 1.1A; Operating Supply Current: 700uA; Drain to Source Resistance: 350mR; Max Output Voltage: 8.85V; Min Output Voltage: 8.15V; Fault Protection: Over Voltage; Supplier 1: Rs; RoHS: Yes; Category: Battery Management; Stock 1: 128; Pricing 1: 1=-1.00000, 25=1.85000, 100=1.76000 (GBP); Mounting Technology: Surface Mount; Case/Package: DFN; Pins: 10; Min Operating Temperature: -40°C; Max Operating Temperature: 85°C; Package Quantity: 120; Packaging: Rail/Tube; Number of Channels: 2; Max Charge Current: 1.1A; Voltage Rating: 8.85V; Series: -; Battery Pack Voltage: 8.4V; Length: 3mm; Width: 3mm; Height: 0.88mm; Radiation Hardening: No; Reach SVHC Compliant: Yes; Lead Free: Lead Free; RoHS Compliant: Yes; ComponentLink1URL: https://datasheet.ciiva.com/1137/554364-1137792.pdf?src-supplier=Element14; ComponentLink1Description: https://datasheet.ciiva.com/1137/554364-1137792.pdf?src-supplier=Element14; ComponentLink2URL: https://datasheet.ciiva.com/16453/filehandler-aspxddocname-en544011-16453863.pdf?src-supplier=Future+Electronics; ComponentLink2Description: https://datasheet.ciiva.com/16453/filehandler-aspxddocname-en544011-16453863.pdf?src-supplier=Future+Electronics; ComponentLink3URL: https://datasheet.ciiva.com/1137/22190b-1137793.pdf?src-supplier=Element14; ComponentLink3Description: https://datasheet.ciiva.com/1137/22190b-1137793.pdf?src-supplier=Element14; ComponentLink4URL: https://datasheet.ciiva.com/4873/22190a-13379-4873436.pdf?src-supplier=Mouser; ComponentLink4Description: https://datasheet.ciiva.com/4873/22190a-13379-4873436.pdf?src-supplier=Mouser; ComponentLink5URL: https://datasheet.ciiva.com/3213/22190b-3213399.pdf?src-supplier=Avnet; ComponentLink5Description: https://datasheet.ciiva.com/3213/22190b-3213399.pdf?src-supplier=Avnet; ComponentLink6URL: https://datasheet.ciiva.com/1933/22190b-1933113.pdf?src-supplier=Digi-Key; ComponentLink6Description: https://datasheet.ciiva.com/1933/22190b-1933113.pdf?src-supplier=Digi-Key; Supplier Part Number 1: 6878660; LCSC Part Number: C60668; Item Type: IC
footprint TDFN-10-EP(3x3)
pins: 1 VDD, 2 VDD, 3 VBAT, 4 VBAT, 5 NC, 6 NC, 7 STAT, 8 VSS, 9 VSS, 10 PROG, 11 EP

## MCP73831-2DCI/MC
designator U?
IC BATT CONTRL LI-ION 1CELL 8DFN; Manufacturer: Microchip; Manufacturer Part Number: MCP73831-2DCI/MC; Supplier: Digi-Key; Supplier Part Number: MCP73831-2DCI/MC-ND; RoHS: Yes; Category: Battery Management; Stock: 1881; Pricing: 1=0.82, 25=0.7, 100=0.63 (USD); ComponentLink1URL: https://datasheet.ciiva.com/12238/21984e-53484-12238219.pdf?src-supplier=Mouser; ComponentLink1Description: https://datasheet.ciiva.com/12238/21984e-53484-12238219.pdf?src-supplier=Mouser; ComponentLink2URL: https://datasheet.ciiva.com/3215/21984e-3215293.pdf?src-supplier=Avnet; ComponentLink2Description: https://datasheet.ciiva.com/3215/21984e-3215293.pdf?src-supplier=Avnet; ComponentLink3URL: https://datasheet.ciiva.com/1933/21984e-1933417.pdf?src-supplier=Digi-Key; ComponentLink3Description: https://datasheet.ciiva.com/1933/21984e-1933417.pdf?src-supplier=Digi-Key; LCSC Part Number: C635037; Item Type: IC
footprint DFN-8-EP(2x3)
pins: 1 VDD, 2 VDD, 3 VBAT, 4 VBAT, 5 STAT, 6 VSS, 7 NC, 8 PROG, 9 GND

## MCP73831T-2ACI/OT
designator U?
IC BATT CNTL LI-ION 1CEL SOT23-5; Manufacturer: Microchip; Manufacturer Part Number: MCP73831T-2ACI/OT; Number of Cells: 1; Max Supply Voltage: 6V; Output Voltage: 4.2V; Min Supply Voltage: 3.75V; Output Current: 500mA; Max Output Voltage: 4.5V; Max Power Dissipation: 1.54W; Drain to Source Resistance: 350mR; Min Output Voltage: 4.168V; Voltage Rating: 4.534V; Fault Protection: Over Voltage; Supplier: Rs; Supplier Part Number: 7386360; RoHS: Yes; Category: Battery Management; Stock: 95; Pricing: 5=0.708, 25=0.684, 100=0.664 (GBP); Mounting Technology: Surface Mount; Case/Package: SOT-23; Pins: 5; Weight: 0.00709oz; Min Operating Temperature: -40°C; Max Operating Temperature: 85°C; Number of Outputs: 1; Packaging: Tape and Reel; Number of Channels: 1; Termination: SMD/SMT; Max Charge Current: 500mA; Series: -; Battery Pack Voltage: 4.2V; Length: 3.1mm; Width: 1.8mm; Height: 1.3mm; Radiation Hardening: No; Reach SVHC Compliant: No; Lead Free: Lead Free; RoHS Compliant: Yes; ComponentLink1URL: https://datasheet.ciiva.com/22828/0900766b80d2b53a-22828876.pdf?src-supplier=Rs; ComponentLink1Description: https://datasheet.ciiva.com/22828/0900766b80d2b53a-22828876.pdf?src-supplier=Rs; ComponentLink2URL: https://datasheet.ciiva.com/26344/651521-da-01-en-contr-mcp73831t-2aci-ot-sot-23-5-mcp-26344458.pdf?src-supplier=Conrad; ComponentLink2Description: https://datasheet.ciiva.com/26344/651521-da-01-en-contr-mcp73831t-2aci-ot-sot-23-5-mcp-26344458.pdf?src-supplier=Conrad; ComponentLink3URL: https://datasheet.ciiva.com/1137/630369-1137803.pdf?src-supplier=Element14; ComponentLink3Description: https://datasheet.ciiva.com/1137/630369-1137803.pdf?src-supplier=Element14; ComponentLink4URL: https://datasheet.ciiva.com/28626/630369-28626439.pdf?src-supplier=Element14; ComponentLink4Description: https://datasheet.ciiva.com/28626/630369-28626439.pdf?src-supplier=Element14; ComponentLink5URL: https://datasheet.ciiva.com/46385/630369-46385324.pdf?src-supplier=Element14; ComponentLink5Description: https://datasheet.ciiva.com/46385/630369-46385324.pdf?src-supplier=Element14; ComponentLink6URL: https://datasheet.ciiva.com/1144/630369-1144461.pdf?src-supplier=Newark; ComponentLink6Description: https://datasheet.ciiva.com/1144/630369-1144461.pdf?src-supplier=Newark; LCSC Part Number: C424093; Item Type: IC
footprint SOT-23-5
pins: 1 STAT, 2 VSS, 3 VBAT, 4 VDD, 5 PROG

## MCP73832T-2ACI/OT
designator U?
IC LI-ION/LI-POLY CTRLR SOT23-5; Manufacturer: Microchip; Manufacturer Part Number: MCP73832T-2ACI/OT; Supplier: Rs; Supplier Part Number: 7386364P; RoHS: Yes; Category: Battery Management; Stock: 5495; Pricing: 25=0.6, 100=0.582 (GBP); ComponentLink1URL: https://datasheet.ciiva.com/1931/21984e-1931959.pdf?src-supplier=Digi-Key; ComponentLink1Description: https://datasheet.ciiva.com/1931/21984e-1931959.pdf?src-supplier=Digi-Key; ComponentLink2URL: https://datasheet.ciiva.com/1931/21984e-1931960.pdf?src-supplier=Digi-Key; ComponentLink2Description: https://datasheet.ciiva.com/1931/21984e-1931960.pdf?src-supplier=Digi-Key; ComponentLink3URL: https://datasheet.ciiva.com/1931/21984e-1931961.pdf?src-supplier=Digi-Key; ComponentLink3Description: https://datasheet.ciiva.com/1931/21984e-1931961.pdf?src-supplier=Digi-Key; LCSC Part Number: C38066; Item Type: IC
footprint SOT-23-5
pins: 1 STAT, 2 VSS, 3 VBAT, 4 VDD, 5 PROG

## MCS20FC-2R2MMP
designator L?, comment 2.2uH
IND SMD 1.5A 2.2uH ±20% 135mΩ; Manufacturer: PSA(Prosperity Dielectrics); Manufacturer Part Number: MCS20FC-2R2MMP; Item Type: Inductor; Package: SMD; LCSC Part Number: C375949; ComponentLink1Description: LCSC; ComponentLink1URL: https://www.lcsc.com/product-detail/Power-Inductors_PSA-Prosperity-Dielectrics-MCS20FC-2R2MMP_C375949.html
footprint MCS20FC-2R2MMP. (IND SMD 2.2uH 1.5A)
pins: 1, 2

## MCS0402MD1004BE000
designator R?, comment 1MR
RES 1M OHM 0.1% 1/16W 0402; Manufacturer: Vishay BCcomponents; Manufacturer Part Number: MCS0402MD1004BE000; Item Type: Resistor; Supplier: Mouser; Supplier Part Number: 594-MCS0402MD1004BE0; RoHS: Yes; Category: Chip SMD Resistors; Stock: 33788; Pricing: 1=0.56, 10=0.293, 50=0.293, 100=0.16, 1000=0.121, 10000=0.117 (USD); LCSC Part Number: C4334825
footprint Res-0402
pins: 1, 2

## MCS0630-3R3MN2
designator L?, comment 3.3uH
6A 3.3uH ±20% SMD Power Inductors ROHS; Manufacturer: PSA(Prosperity Dielectrics); Manufacturer Part Number: MCS0630-3R3MN2; Package: SMD; LCSC Part Number: C394166; Item Type: Inductor; ComponentLink1Description: LCSC; ComponentLink1URL: https://www.lcsc.com/product-detail/Power-Inductors_PSA-Prosperity-Dielectrics-MCS0630-3R3MN2_C394166.html
footprint MCS0630-3R3MN2
pins: 1, 2

## MDA7050-330M
designator L?, comment 33uH
33uH 2.3A ±20% SMD,6.6x7.3mm Inductors; Manufacturer: KOHERelec; Manufacturer Part Number: MDA7050-330M; LCSC Part Number: C2847546; Package: SMD,6.6x7.3mm; ComponentLink1Description: LCSC; ComponentLink1URL: https://www.lcsc.com/product-detail/Inductors-SMD_KOHERelec-MDA7050-330M_C2847546.html; Item Type: Inductor
footprint MDA7050_330M
pins: 1, 2

## ME3116AM6G
designator U?
Step-down type SOT-23-6 DC-DC Converters ROHS; Manufacturer: MICRONE; Manufacturer Part Number: ME3116AM6G; Item Type: IC; Package: SOT-23-6; LCSC Part Number: C97643; ComponentLink1Description: LCSC; ComponentLink1URL: https://www.lcsc.com/product-detail/DC-DC-Converters_MICRONE-Nanjing-Micro-One-Elec-ME3116AM6G_C97643.html
footprint SOT-23-6
pins: 1 BS, 2 GND, 3 FB, 4 EN, 5 IN, 6 SW

## ME6210A33PG
designator U?
500mA 260mV@(200mA) Fixed 3.3V~3.3V Positive 1 18V SOT-89 Linear Voltage Regulators (LDO) ROHS; Manufacturer: MICRONE; Manufacturer Part Number: ME6210A33PG; Item Type: IC; Package: SOT-89; LCSC Part Number: C85233; ComponentLink1Description: LCSC; ComponentLink1URL: https://www.lcsc.com/product-detail/Linear-Voltage-Regulators-LDO_MICRONE-Nanjing-Micro-One-Elec-ME6210A33PG_C85233.html
footprint SOT-89
pins: 1 VSS, 2 Vin, 3 VOUT, 4 Vin

## MEM104J2A-7-50R0-T3.5
designator C?, comment 100nF
100nF ±5% 100V Plugin,P=5mm Polypropylene Film Capacitors (CBB) ROHS; Manufacturer: Hongzhi Elec; Manufacturer Part Number: MEM104J2A-7-50R0-T3.5; Package: Plugin,P=5mm; LCSC Part Number: C333838; Item Type: Capacitor; ComponentLink1Description: LCSC; ComponentLink1URL: https://www.lcsc.com/product-detail/Polypropylene-Film-Capacitors-span-style-background-color-ff0-CBB-span_Hongzhi-Elec-MEM104J2A-7-50R0-T3-5_C333838.html
footprint MEM104J2A-7-50R0-T3.5
pins: 1, 2

## MF-MSMF010-2
designator F?
60V 100mA 40A 300mA 1812 Resettable Fuses ROHS; Manufacturer: Bourns; Manufacturer Part Number: MF-MSMF010-2; Time to Trip: 1.5s; Item Type: Fuse; Supplier 1: Arrow Electronics; RoHS: Yes; Category: Fuses; Stock 1: 75000; Pricing 1: 3000=0.1392 (USD); Mounting Technology: Surface Mount; Case Code (Imperial): 1812; Case Code (Metric): 4532; Min Operating Temperature: -40°C; Max Operating Temperature: 85°C; Packaging: Cut Tape; Max Current Rating: 40A; Hold Current: 100mA; Trip Current: 300mA; Series: Multifuse®, MF-MSMF; Voltage Rating: 60V; Ratings: AEC-Q200; RoHS Compliant: Yes; ComponentLink1URL: http://www.farnell.com/datasheets/2264697.pdf?src-supplier=Farnell; ComponentLink1Description: http://www.farnell.com/datasheets/2264697.pdf?src-supplier=Farnell; ComponentLink2URL: http://www.farnell.com/datasheets/2264697.pdf?src-supplier=Newark; ComponentLink2Description: http://www.farnell.com/datasheets/2264697.pdf?src-supplier=Newark; ComponentLink3URL: http://www.farnell.com/datasheets/2264697.pdf?src-supplier=Element14; ComponentLink3Description: http://www.farnell.com/datasheets/2264697.pdf?src-supplier=Element14; ComponentLink4URL: http://www.farnell.com/datasheets/1786007.pdf?src-supplier=Newark; ComponentLink4Description: http://www.farnell.com/datasheets/1786007.pdf?src-supplier=Newark; ComponentLink5URL: https://www.bourns.com/docs/Product-Datasheets/mfmsmf.pdf?src-supplier=Digi-Key; ComponentLink5Description: https://www.bourns.com/docs/Product-Datasheets/mfmsmf.pdf?src-supplier=Digi-Key; Supplier Part Number 1: MF-MSMF010-2; LCSC Part Number: C12430
footprint Fuse-1812_
pins: 1, 2

## MGFL2012F100MT-LF
designator L?, comment 10uH
IND SMD 10uH 500mA 0805; Manufacturer: microgate; Manufacturer Part Number: MGFL2012F100MT-LF; Tolerance: ±20%; DC Resistance (DCR): 320mΩ; Item Type: Inductor; Inductance: 10uH; Rated Current: 500mA; LCSC Part Number: C281113
footprint Ind-0805 (Inductor 0805)
pins: 1, 2

## MHCI06030-1R5M-R8A
designator L?, comment 1.5uH
10A 1.5uH ±20% 12.1mΩ SMD Power Inductors ROHS; Manufacturer Part Number: MHCI06030-1R5M-R8A; Manufacturer: Chilisin Elec; LCSC Part Number: C329386; Value: 1.5uH; Item Type: Inductor; ComponentLink1Description: LCSC; ComponentLink1URL: https://www.lcsc.com/product-detail/Power-Inductors_Chilisin-Elec-MHCI06030-1R5M-R8A_C329386.html
footprint MHCI06030-1R5M-R8A
pins: 1, 2

## MHP0302-2R2M
designator L?, comment 2.2uH
2.8A 2.2uH ±20% 60mΩ 4A SMD,3.4x3x1.8mm Power Inductors ROHS; Manufacturer: Me-TECH; Manufacturer Part Number: MHP0302-2R2M; Footprint: Custom; ComponentLink1Description: LCSC; ComponentLink1URL: https://lcsc.com/product-detail/Power-Inductors_Me-TECH-MHP0302-2R2M_C2934937.html; LCSC Part Number: C2934937
footprint MHP0302-2R2M_
pins: 1, 2

## MHP5050RGBDT
designator LED?
20mA White Diffused -40℃~+85℃ RGB SMD5050 Light Emitting Diodes (LED) ROHS; Manufacturer: MEIHUA; Manufacturer Part Number: MHP5050RGBDT; Item Type: RGB LED; LCSC Part Number: C409780; Package: SMD5050; ComponentLink1Description: LCSC; ComponentLink1URL: https://www.lcsc.com/product-detail/Light-Emitting-Diodes-LED_MEIHUA-MHP5050RGBDT_C409780.html
footprint SMD5050
pins: 1, 2, 3, 4, 5, 6

## MIC2004-0.5YM5-TR
designator U?
IC PWR SWITCH P-CHAN 1:1 SOT23-5; Manufacturer: Microchip; Manufacturer Part Number: MIC2004-0.5YM5-TR; Supplier 1: Digi-Key; RoHS: Yes; Category: Hot Swap Controllers; Stock 1: 5462; Pricing 1: 1=0.79000, 25=0.65000, 100=0.59000 (USD); ComponentLink1URL: http://components.arrow.com/part/dataview/42608079S9274031N1374?src-supplier=Arrow+Electronics; ComponentLink1Description: http://components.arrow.com/part/dataview/42608079S9274031N1374?src-supplier=Arrow+Electronics; ComponentLink2URL: http://uk.rs-online.com/webdocs/0f82/0900766b80f822a9.pdf?src-supplier=RSComponents; ComponentLink2Description: http://uk.rs-online.com/webdocs/0f82/0900766b80f822a9.pdf?src-supplier=RSComponents; ComponentLink3URL: http://components.arrow.com/part/dataview/0323_00165048?src-supplier=Arrow+Europe; ComponentLink3Description: http://components.arrow.com/part/dataview/0323_00165048?src-supplier=Arrow+Europe; ComponentLink4URL: http://www.mouser.com/ds/2/268/mic20xx-778478.pdf?src-supplier=Mouser; ComponentLink4Description: http://www.mouser.com/ds/2/268/mic20xx-778478.pdf?src-supplier=Mouser; ComponentLink5URL: http://www.farnell.com/datasheets/1670778.pdf?src-supplier=Element14; ComponentLink5Description: http://www.farnell.com/datasheets/1670778.pdf?src-supplier=Element14; ComponentLink6URL: http://www.microchip.com/mymicrochip/filehandler.aspx?ddocname=en579487&src-supplier=Digi-Key; ComponentLink6Description: http://www.microchip.com/mymicrochip/filehandler.aspx?ddocname=en579487&src-supplier=Digi-Key; ComponentLink7URL: http://www.micrel.com/_PDF/mic20xx.pdf?src-supplier=Future+Electronics; ComponentLink7Description: http://www.micrel.com/_PDF/mic20xx.pdf?src-supplier=Future+Electronics; Supplier Part Number 1: 576-2582-1-ND; LCSC Part Number: C625648; Item Type: IC
footprint SOT-23-5
pins: 1 VIN, 2 GND, 3 ENABLE, 4 NC, 5 VOUT

## MIC2009YM6-TR
designator U?
IC PWR SWITCH P-CHAN 1:1 SOT23-6; Manufacturer: Microchip; Manufacturer Part Number: MIC2009YM6-TR; Number of Outputs: 1; Min Supply Voltage: 2.5V; Max Supply Voltage: 5.5V; Nominal Supply Current: 330uA; Interface: On/Off; Max Output Current: 2A; On-State Resistance: 70mR; Turn-On Delay Time: 1500us; Output Voltage: 6V; Fault Protection: Over Temperature; Output Configuration: High Side; On-state Resistance-Max: 100MR; Supplier 1: RSComponents; RoHS: Yes; Category: Hot Swap Controllers; Stock 1: 1; Pricing 1: 5=1.39500, 25=1.35500, 100=1.30600 (USD); Mount: Surface Mount; Case/Package: SOT-23; Number of Pins: 6; Min Operating Temperature: -40°C; Max Operating Temperature: 85°C; Packaging: Tape and Reel; Package Quantity: 3000; Max Input Voltage: 5.5V; Min Input Voltage: 2.5V; Series: -; Supply Current: 330uA; Number of Switches: 1; Length: 2.9mm; Width: 1.75mm; Height: 1.3mm; Radiation Hardening: No; REACH SVHC: No SVHC; Lead Free: Lead Free; RoHS Compliant: Yes; ComponentLink1URL: https://datasheet.ciiva.com/15108/getdatasheetpartid-300509-15108513.pdf?src-supplier=Verical; ComponentLink1Description: https://datasheet.ciiva.com/15108/getdatasheetpartid-300509-15108513.pdf?src-supplier=Verical; ComponentLink2URL: https://datasheet.ciiva.com/7643/1670778-7643767.pdf?src-supplier=Element14; ComponentLink2Description: https://datasheet.ciiva.com/7643/1670778-7643767.pdf?src-supplier=Element14; ComponentLink3URL: https://datasheet.ciiva.com/1962/mic20xx-1962500.pdf?src-supplier=Digi-Key; ComponentLink3Description: https://datasheet.ciiva.com/1962/mic20xx-1962500.pdf?src-supplier=Digi-Key; ComponentLink4URL: https://datasheet.ciiva.com/1962/mic20xx-1962499.pdf?src-supplier=Digi-Key; ComponentLink4Description: https://datasheet.ciiva.com/1962/mic20xx-1962499.pdf?src-supplier=Digi-Key; ComponentLink5URL: https://datasheet.ciiva.com/1962/mic20xx-1962501.pdf?src-supplier=Digi-Key; ComponentLink5Description: https://datasheet.ciiva.com/1962/mic20xx-1962501.pdf?src-supplier=Digi-Key; ComponentLink6URL: https://datasheet.ciiva.com/16382/mic20xx-16382581.pdf?src-supplier=Future+Electronics; ComponentLink6Description: https://datasheet.ciiva.com/16382/mic20xx-16382581.pdf?src-supplier=Future+Electronics; Supplier Part Number 1: 9101688; Item Type: IC
footprint SOT-23-6
pins: 1 VIN, 2 GND, 3 ENABLE, 4 FAULT, 5 ILIMT, 6 VOUT

## MIC29300-3.3WU-TR
designator U?
IC REG LINEAR 3.3V 3A TO263-3; Manufacturer: Microchip; Manufacturer Part Number: MIC29300-3.3WU-TR; Dropout Voltage: 370mV; Number of Regulators: 1; Supplier 1: Digi-Key; Stock 1: 1; Pricing 1: 1=3.65, 25=3.05, 100=2.77 (USD); Mount: Surface Mount; Case/Package: TO-263-4; Min Operating Temperature: -40°C; Max Operating Temperature: 125°C; Packaging: Tape and Reel; Output Voltage: 3.3V; Output Current: 3A; Lead Free: Lead Free; ComponentLink1URL: http://www.micrel.com/_PDF/mic29150.pdf?src-supplier=Future+Electronics; ComponentLink1Description: http://www.micrel.com/_PDF/mic29150.pdf?src-supplier=Future+Electronics; ComponentLink2URL: http://www.micrel.com/_PDF/mic29150.pdf?src-supplier=Digi-Key; ComponentLink2Description: http://www.micrel.com/_PDF/mic29150.pdf?src-supplier=Digi-Key; Supplier Part Number 1: MIC29300-3.3WU-CT-ND; LCSC Part Number: C481370; Item Type: IC
footprint TO263-3_
pins: 1 VIN, 2 GND, 3 OUT, 4 TAB

## MIC29302WU-TR
designator U?
IC REG LDO ADJ 3A TO263-5; Manufacturer: Microchip; Manufacturer Part Number: MIC29302WU-TR; Output Voltage: 26V; Dropout Voltage: 370mV; Number of Regulators: 1; Min Input Voltage: 2.5V; Min Output Voltage: 1.25V; Max Output Voltage: 25V; Output Type: Adjustable; Output Configuration: Positive; Input Bias Current: 40nA; Reference Voltage: 1.24V; Quiescent Current: 35mA; Accuracy: 1%; Supplier 1: Future Electronics; RoHS: Yes; Category: Voltage Regulators - Linear; Pricing 1: 750=2.12000, 1500=2.09000, 2250=2.07000, 3000=2.06000, 3750=2.02000 (USD); Mount: Surface Mount; Case/Package: TO-263; Number of Pins: 5; Min Operating Temperature: -40°C; Max Operating Temperature: 125°C; Packaging: Tape and Reel; Package Quantity: 750; Series: -; Output Current: 3A; Max Input Voltage: 26V; Polarity: Positive; Number of Outputs: 1; Max Output Current: 3A; Length: 10.67mm; Width: 9.17mm; Height: 4.59mm; Radiation Hardening: No; Reach SVHC Compliant: Yes; RoHS Compliant: Yes; Lead Free: Lead Free; ComponentLink1URL: https://datasheet.ciiva.com/23772/1572633-23772885.pdf?src-supplier=Newark; ComponentLink1Description: https://datasheet.ciiva.com/23772/1572633-23772885.pdf?src-supplier=Newark; ComponentLink2URL: https://datasheet.ciiva.com/16296/mic29150-16296190.pdf?src-supplier=Future+Electronics; ComponentLink2Description: https://datasheet.ciiva.com/16296/mic29150-16296190.pdf?src-supplier=Future+Electronics; ComponentLink3URL: https://datasheet.ciiva.com/15200/getdatasheetpartid-143209-15200663.pdf?src-supplier=Verical; ComponentLink3Description: https://datasheet.ciiva.com/15200/getdatasheetpartid-143209-15200663.pdf?src-supplier=Verical; Supplier Part Number 1: 3153683; LCSC Part Number: C11149; Item Type: IC
footprint TO-263-5 (D2PAK)
pins: 1 EN, 2 IN, 3 GND, 4 OUT, 5 ADJ, 6 GND

## MIC94062YC6-TR
designator U?
IC PWR SWITCH P-CHAN 1:1 SC70-6; Manufacturer: Microchip; Manufacturer Part Number: MIC94062YC6-TR; Number of Outputs: 1; Output Current: 2A; Min Supply Voltage: 1.7V; Max Supply Voltage: 5.5V; Turn-Off Delay Time: 200ns; On-State Resistance: 77mR; Turn-On Delay Time: 1.5us; Interface: On/Off; Output Configuration: High Side; On-state Resistance-Max: 110MR; Supplier 1: Newark; RoHS: Yes; Category: Hot Swap Controllers; Pricing 1: 1=0.67500, 3000=0.67500 (USD); Mount: Surface Mount; Case/Package: SC; Number of Pins: 6; Min Operating Temperature: -40°C; Max Operating Temperature: 125°C; Packaging: Tape and Reel; Nominal Supply Current: 2A; Package Quantity: 3000; Number of Inputs: 1; Max Output Current: 2A; Max Input Voltage: 5.5V; Min Input Voltage: 1.7V; Current Rating: 2A; Operating Supply Voltage: 5.5V; Number of Channels: 1; Supply Current: 2A; Series: -; Rated Current-Max: 2A; Length: 2.2mm; Width: 1.35mm; Height: 1mm; Radiation Hardening: No; REACH SVHC: No SVHC; Lead Free: Lead Free; RoHS Compliant: Yes; ComponentLink1URL: https://datasheet.ciiva.com/16217/mic94062-63-16217137.pdf?src-supplier=Future+Electronics; ComponentLink1Description: https://datasheet.ciiva.com/16217/mic94062-63-16217137.pdf?src-supplier=Future+Electronics; ComponentLink2URL: https://datasheet.ciiva.com/15108/getdatasheetpartid-57136-15108928.pdf?src-supplier=Verical; ComponentLink2Description: https://datasheet.ciiva.com/15108/getdatasheetpartid-57136-15108928.pdf?src-supplier=Verical; ComponentLink3URL: https://datasheet.ciiva.com/7642/250162-7642583.pdf?src-supplier=Element14; ComponentLink3Description: https://datasheet.ciiva.com/7642/250162-7642583.pdf?src-supplier=Element14; ComponentLink4URL: https://datasheet.ciiva.com/1955/mic94062-63-1955048.pdf?src-supplier=Digi-Key; ComponentLink4Description: https://datasheet.ciiva.com/1955/mic94062-63-1955048.pdf?src-supplier=Digi-Key; ComponentLink5URL: https://datasheet.ciiva.com/1955/mic94062-63-1955047.pdf?src-supplier=Digi-Key; ComponentLink5Description: https://datasheet.ciiva.com/1955/mic94062-63-1955047.pdf?src-supplier=Digi-Key; ComponentLink6URL: https://datasheet.ciiva.com/1955/mic94062-63-1955049.pdf?src-supplier=Digi-Key; ComponentLink6Description: https://datasheet.ciiva.com/1955/mic94062-63-1955049.pdf?src-supplier=Digi-Key; Supplier Part Number 1: 71Y3240; Item Type: IC
footprint SC-70-6_
pins: 1 VOUT, 2 GND, 3 ENABLE, 4 VIN, 5 GND, 6 NC

## MIC94082YFT-TR
designator U?
Power Switch Hi Side 2A 4-Pin Thin MLF T/R; Manufacturer: Microchip; Manufacturer Part Number: MIC94082YFTTR; Number of Outputs: 1; Min Supply Voltage: 1.7V; Max Supply Voltage: 5.5V; Interface: On/Off; Turn-Off Delay Time: 200ns; On-State Resistance: 67mR; Turn-On Delay Time: 1.5us; Output Configuration: High Side; Supplier 1: Digi-Key; RoHS: Yes; Category: Hot Swap Controllers; Mount: Surface Mount; Number of Pins: 4; Min Operating Temperature: -40°C; Max Operating Temperature: 125°C; Nominal Supply Current: 2A; Output Current: 2A; Packaging: Tape and Reel; Package Quantity: 5000; Current Rating: 2A; Max Output Current: 2A; Series: -; Supply Current: 2A; Rated Current-Max: 2A; On-state Resistance-Max: 67MR; Radiation Hardening: No; REACH SVHC: No SVHC; Lead Free: Lead Free; RoHS Compliant: Yes; ComponentLink1URL: https://datasheet.ciiva.com/1955/mic94080-5-1955731.pdf?src-supplier=Digi-Key; ComponentLink1Description: https://datasheet.ciiva.com/1955/mic94080-5-1955731.pdf?src-supplier=Digi-Key; ComponentLink2URL: https://datasheet.ciiva.com/1955/mic94080-5-1955730.pdf?src-supplier=Digi-Key; ComponentLink2Description: https://datasheet.ciiva.com/1955/mic94080-5-1955730.pdf?src-supplier=Digi-Key; ComponentLink3URL: https://datasheet.ciiva.com/1955/mic94080-5-1955732.pdf?src-supplier=Digi-Key; ComponentLink3Description: https://datasheet.ciiva.com/1955/mic94080-5-1955732.pdf?src-supplier=Digi-Key; ComponentLink4URL: https://datasheet.ciiva.com/16466/mic94080-5-16466430.pdf?src-supplier=Future+Electronics; ComponentLink4Description: https://datasheet.ciiva.com/16466/mic94080-5-16466430.pdf?src-supplier=Future+Electronics; ComponentLink5URL: https://datasheet.ciiva.com/26948/getdatasheetpartid-792432-26948156.pdf?src-supplier=Verical; ComponentLink5Description: https://datasheet.ciiva.com/26948/getdatasheetpartid-792432-26948156.pdf?src-supplier=Verical; Supplier Part Number 1: 576-3342-1-ND; LCSC Part Number: C145403
footprint 4-TMLF® (0.85x0.85)
pins: 1 VOUT, 2 GND, 3 VIN, 4 EN